# EAGLE library part IC_BUFF_74LVCH2T45 (library dp_devices.v6)
74LVCH2T45 Dual supply translating transceiver; 3-state
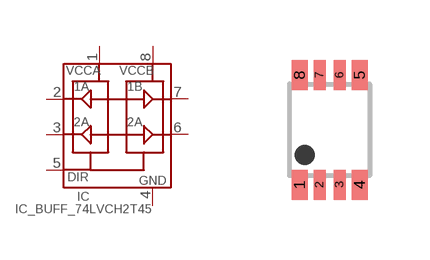
[diagram p177: symbol with the pads of VSSOP-8_SOT765-1; footprint VSSOP-8_SOT765-1]

Designator prefix IC

## IC_BUFF_74LVCH2T45  [VSSOP-8_SOT765-1]
1  VCCA  pwr
2  1A
3  2A
4  GND  pwr
5  DIR  in
6  2B
7  1B
8  VCCB  pwr

## Footprint VSSOP-8_SOT765-1 (pad centres in mm)
VSSOP-8 / SOT765-1 plastic very thin small outline package 8 pitch: 0.5mm
smd 0.4 x 0.75: 1 -0.75,-1.375; 4 0.75,-1.375; 5 0.75,1.375; 8 -0.75,1.375
smd 0.3 x 0.75: 2 -0.25,-1.375; 3 0.25,-1.375; 6 0.25,1.375; 7 -0.25,1.375